# Altium footprint library Switches.PcbLib: 1 footprints
Each footprint in its own frame and in the unit in brackets; x right, y up, seen from the top. Pads: shape width x height; smd on the part's side, far side on the other; paste and mask are expansions set on the pad; w line width, h text height; cw(c..) or ccw(c..) is an arc to the next point about the centre after c.
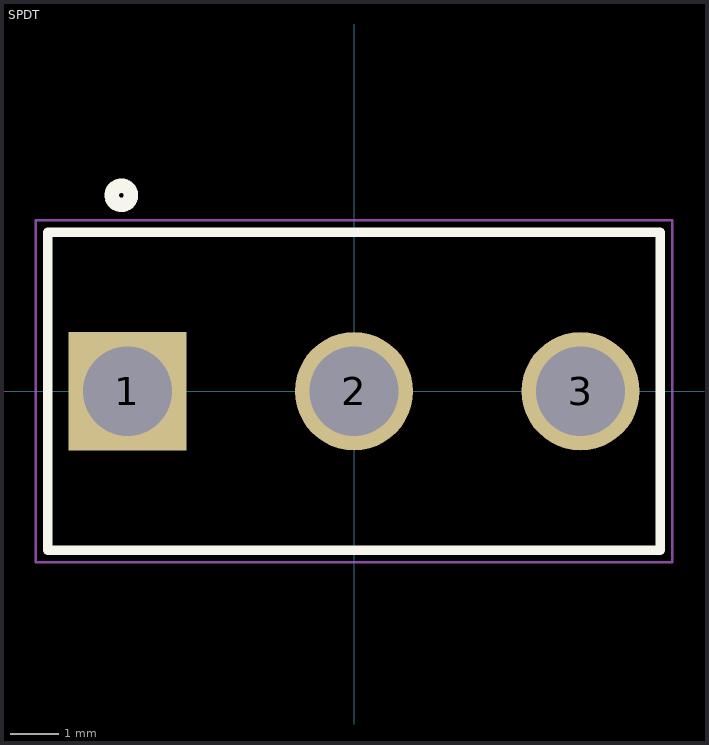
[diagram p0: the footprint, top view; thin cyan lines are the x and y axes]

## SPDT [mm] "SS12D10G3"
pads (3):
  rect 2.45x2.45 hole 1.85: 1(-4.7,0)
  round 2.45 hole 1.85: 2(0,0) 3(4.7,0)
Top Overlay:
  circle w0.3: c-4.826,4.064 r0.2
  lines w0.2: -6.35,-3.3 6.35,-3.3 6.35,3.3 -6.35,3.3 -6.35,-3.3
Mechanical 15:
  lines w0.05: -6.6,-3.55 -6.6,3.55 6.6,3.55 6.6,-3.55 -6.6,-3.55
3D body "step_temp.STEP": height 13.33, standoff -4.44, extent -6.35,-3.302 6.35,3.302